# Altium footprint library laboE_altium.PcbLib: 676 footprints (part 22 of 43)
Each footprint in its own frame and in the unit in brackets; x right, y up, seen from the top. Pads: shape width x height; smd on the part's side, far side on the other; paste and mask are expansions set on the pad; w line width, h text height; cw(c..) or ccw(c..) is an arc to the next point about the centre after c.
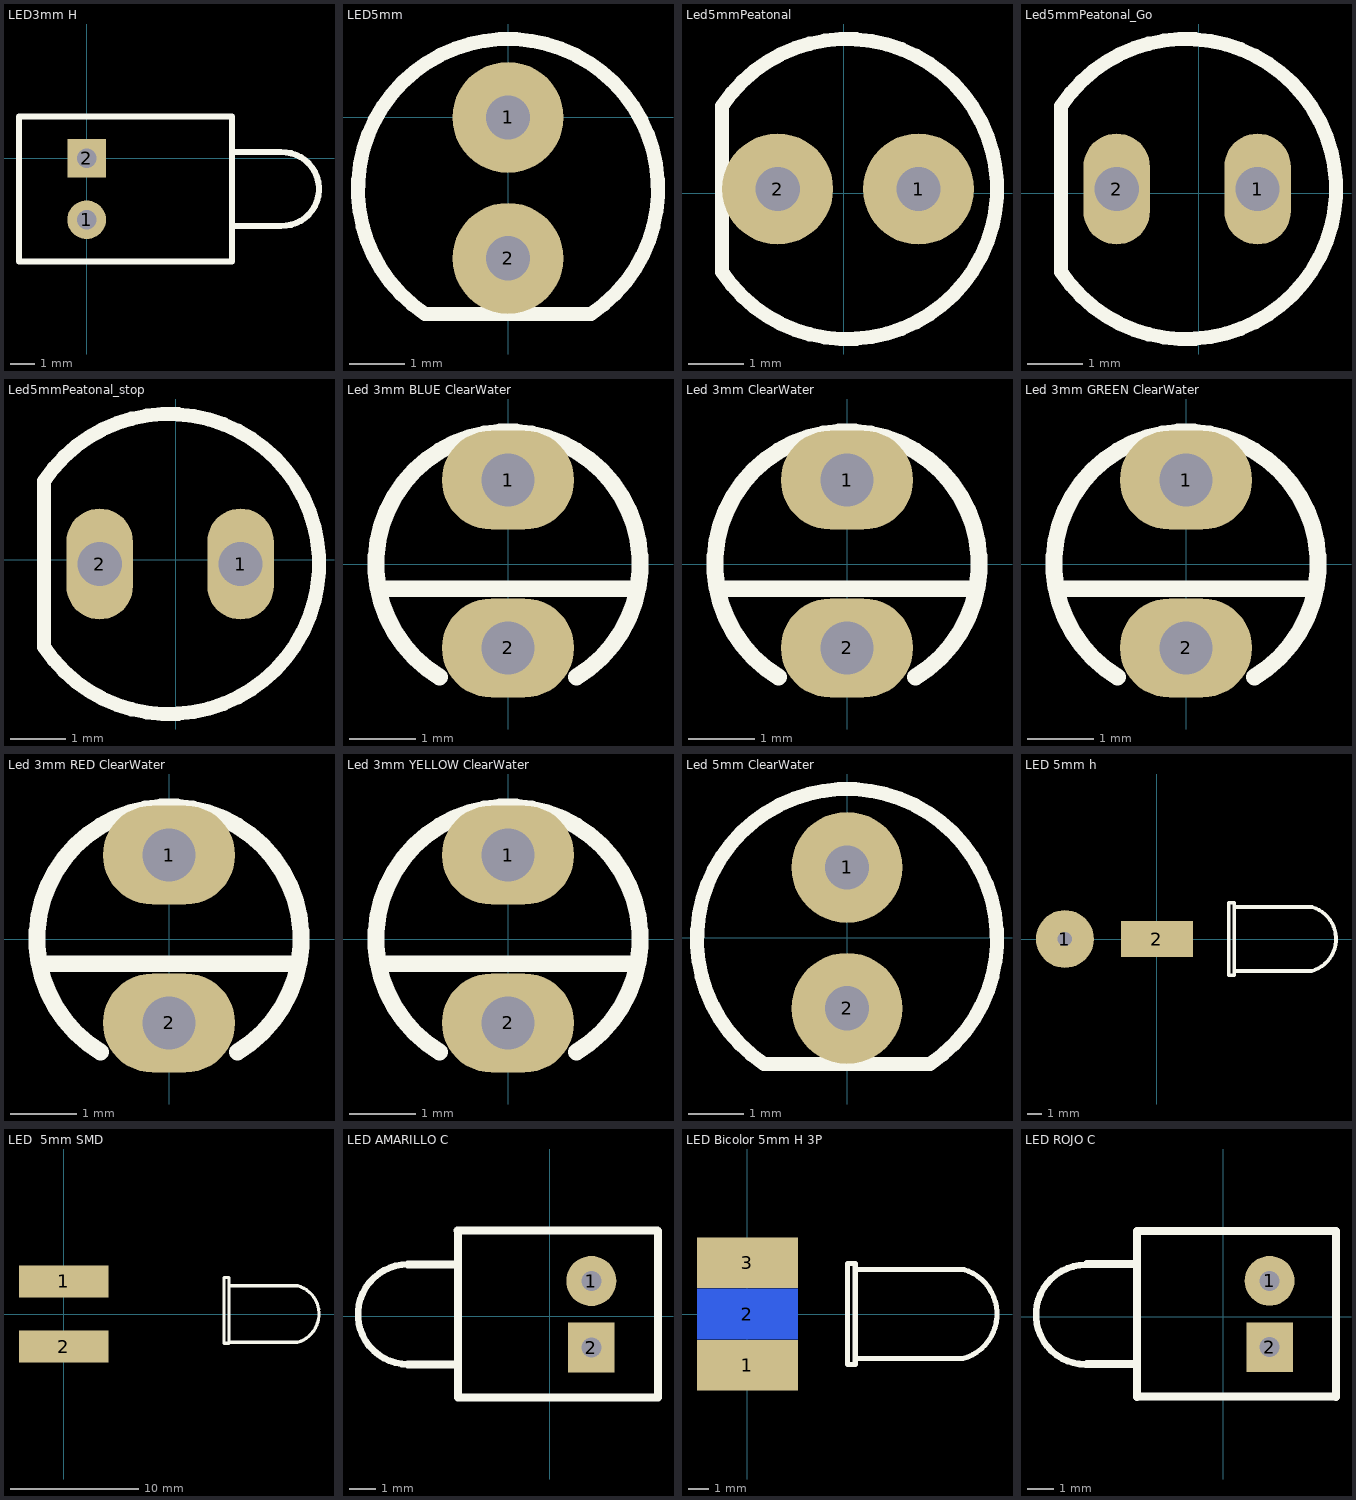
[diagram p21: the footprints below, top view; thin cyan lines are the x and y axes]

## LED3mm H [mm]
pads (2):
  round 1.6 hole 0.8: 1(0,-2.54)
  rect 1.6x1.6 hole 0.8: 2(0,0)
Top Overlay:
  lines w0.254: 0.006,-4.27 6.006,-4.27 ; 6.006,-4.27 6.006,1.73 -2.794,1.73 -2.794,-4.27 6.006,-4.27 ; 6.006,-2.794 6.006,0.254 8.038,0.254 cw(c8.078,-1.27) 8.038,-2.794 6.006,-2.794

## LED5mm [mm]
pads (2):
  round 2 hole 0.8: 1(0,0) 2(0,-2.54)
Top Overlay:
  lines w0.254: -1.5,-3.54 cw(c0,-1.29) 1.5,-3.54 -1.5,-3.54

## Led5mmPeatonal [mm]
pads (2):
  round 2 hole 0.8: 1(1.348,0.076) 2(-1.192,0.076)
Top Overlay:
  lines w0.254: -2.192,-1.424 ccw(c0.058,0.076) -2.192,1.576 -2.192,-1.424
3D body: height 0.5, standoff -0.5, extent -1.692,-0.424 -0.692,0.576
3D body: height 0.5, standoff -0.5, extent 0.848,-0.424 1.848,0.576
3D body: height -0.5, standoff -1.5, extent -1.422,-1.424 1.578,1.576
3D body: height -0.5, standoff -8.5, extent -2.421,-2.424 2.577,2.576

## Led5mmPeatonal_Go [mm]
pads (2):
  oval 1.2x2 hole 0.8: 1(1.063,0.074) 2(-1.477,0.074)
Top Overlay:
  lines w0.254: -2.477,-1.426 ccw(c-0.227,0.074) -2.477,1.574 -2.477,-1.426
3D body: height 0.5, standoff -0.5, extent 0.563,-0.426 1.563,0.574
3D body: height 0.5, standoff -0.5, extent -1.977,-0.426 -0.977,0.574
3D body: height -0.5, standoff -8.5, extent -2.706,-2.426 2.292,2.574

## Led5mmPeatonal_stop [mm]
pads (2):
  oval 1.2x2 hole 0.8: 1(1.164,-0.078) 2(-1.376,-0.078)
Top Overlay:
  lines w0.254: -2.376,-1.578 ccw(c-0.126,-0.078) -2.376,1.422 -2.376,-1.578
3D body: height 0.5, standoff -0.5, extent 0.665,-0.578 1.664,0.422
3D body: height 0.5, standoff -0.5, extent -1.875,-0.578 -0.876,0.422
3D body: height -0.5, standoff -8.5, extent -2.604,-2.578 2.393,2.422

## Led 3mm BLUE ClearWater [mm]
pads (2):
  oval 2x1.5 hole 0.8: 1(0,1.27) 2(0,-1.27)
Top Overlay:
  lines w0.254: -1.95,-0.375 1.95,-0.375 ; -1.035,-1.712 cw(c0,-0.001) 1.035,-1.712
3D body: height 5.5, standoff 2.5, extent -1.56,-1.358 1.438,1.642
3D body: height 1, standoff 0, extent -1.761,-1.466 1.779,1.793
3D body: height 4, standoff 0, extent -1.562,-1.358 1.438,1.642

## Led 3mm ClearWater [mm]
pads (2):
  oval 2x1.5 hole 0.8: 1(0,1.27) 2(0,-1.27)
Top Overlay:
  lines w0.254: -1.95,-0.375 1.95,-0.375 ; -1.035,-1.712 cw(c0,-0.001) 1.035,-1.712
3D body: height 4, standoff 0, extent -1.562,-1.358 1.438,1.642
3D body: height 1, standoff 0, extent -1.761,-1.466 1.779,1.793
3D body: height 5.5, standoff 2.5, extent -1.56,-1.358 1.438,1.642

## Led 3mm GREEN ClearWater [mm]
pads (2):
  oval 2x1.5 hole 0.8: 1(0,1.27) 2(0,-1.27)
Top Overlay:
  lines w0.254: -1.95,-0.375 1.95,-0.375 ; -1.035,-1.712 cw(c0,-0.001) 1.035,-1.712
3D body: height 5.5, standoff 2.5, extent -1.56,-1.358 1.438,1.642
3D body: height 1, standoff 0, extent -1.761,-1.466 1.779,1.793
3D body: height 4, standoff 0, extent -1.562,-1.358 1.438,1.642

## Led 3mm RED ClearWater [mm]
pads (2):
  oval 2x1.5 hole 0.8: 1(0,1.27) 2(0,-1.27)
Top Overlay:
  lines w0.254: -1.95,-0.375 1.95,-0.375 ; -1.035,-1.712 cw(c0,-0.001) 1.035,-1.712
3D body: height 4, standoff 0, extent -1.562,-1.358 1.438,1.642
3D body: height 1, standoff 0, extent -1.761,-1.466 1.779,1.793
3D body: height 5.5, standoff 2.5, extent -1.56,-1.358 1.438,1.642

## Led 3mm YELLOW ClearWater [mm]
pads (2):
  oval 2x1.5 hole 0.8: 1(0,1.27) 2(0,-1.27)
Top Overlay:
  lines w0.254: -1.95,-0.375 1.95,-0.375 ; -1.035,-1.712 cw(c0,-0.001) 1.035,-1.712
3D body: height 4, standoff 0, extent -1.562,-1.358 1.438,1.642
3D body: height 1, standoff 0, extent -1.761,-1.466 1.779,1.793
3D body: height 5.5, standoff 2.5, extent -1.56,-1.358 1.438,1.642

## Led 5mm ClearWater [mm]
pads (2):
  round 2 hole 0.8: 1(0,1.27) 2(0,-1.27)
Top Overlay:
  lines w0.254: -1.5,-2.27 cw(c0,-0.02) 1.5,-2.27 -1.5,-2.27
3D body: height 9.5, standoff 4.5, extent -2.559,-2.357 2.438,2.641
3D body: height 1, standoff 0, extent -2.835,-2.372 2.747,2.795
3D body: height 7, standoff 0, extent -2.562,-2.357 2.438,2.642

## LED 5mm h [mm]
pads (2):
  round 4 hole 1: 1(-6.35,0)
  rect 5x2.5 smd: 2(0,0)
Top Overlay:
  lines w0.254: 5.381,-2.212 10.668,-2.212 ccw(c10.059,0.003) 10.711,2.206 ; 5.381,2.212 10.668,2.212 ; 4.953,-2.5 5.334,-2.5 5.334,2.5 4.953,2.5 4.953,-2.5

## LED  5mm SMD [mm]
pads (2):
  rect 7x2.5 smd: 1(0,2.54) 2(0,-2.54)
Top Overlay:
  lines w0.254: 12.881,0 12.881,2.848 12.5,2.848 12.5,-2.286 12.881,-2.286 12.881,2.5 ; 12.928,-2.212 18.215,-2.212 ccw(c17.606,0.003) 18.258,2.206 ; 12.928,2.212 18.215,2.212

## LED AMARILLO C [mil]
pads (2):
  round 75 hole 30: 1(62.72,53.16)
  rect 70x75 hole 30: 2(62.72,-46.84)
Top Overlay:
  lines w10: -212.28,-71.84 cw(c-212.28,3.16) -212.28,78.16
  lines w12: -212.28,-71.84 -137.28,-71.84 ; -212.28,78.16 -137.28,78.16 ; -138.28,129.16 161.72,129.16 ; -137.28,128.16 -137.28,-121.84 ; 162.72,128.16 162.72,-121.84 ; -137.28,-121.84 162.72,-121.84 ; -137.28,-121.84 162.72,-121.84 ; -137.28,-121.84 162.72,-121.84 ; -137.28,-121.84 162.72,-121.84
3D body: height 236.22, standoff 7.87, extent -137.26,-121.82 162.7,128.14
3D body: height 196.85, standoff 39.37, extent -287.26,-71.82 -137.3,78.14
3D body: height 39.37, standoff -39.37, extent 43.19,33.52 82.41,72.81
3D body: height 39.37, standoff -39.37, extent 43.19,-66.48 82.41,-27.19

## LED Bicolor 5mm H 3P [mm]
pads (3):
  rect 5x2.5 smd: 1(0,-2.54) 3(0,2.54)
  rect 5x2.5 smd far side: 2(0,0)
Top Overlay:
  lines w0.254: 5.381,-2.212 10.668,-2.212 ccw(c10.059,0.003) 10.711,2.206 ; 5.381,2.212 10.668,2.212 ; 4.953,-2.5 5.334,-2.5 5.334,2.5 4.953,2.5 4.953,-2.5

## LED ROJO C [mil]
pads (2):
  round 75 hole 30: 1(70,54)
  rect 70x75 hole 30: 2(70,-46)
Top Overlay:
  lines w10: -207,-72 cw(c-207,3) -207,78
  lines w12: -205,-71 -130,-71 ; -205,79 -130,79 ; -130,-121 -130,129 ; -130,-120 170,-120 ; 170,-121 170,129 ; -130,129 170,129 ; -130,129 170,129
3D body: height 196.85, standoff 39.37, extent -281.98,-71.98 -132.02,77.98
3D body: height 236.22, standoff 7.87, extent -129.98,-120.98 169.98,128.98
3D body: height 39.37, standoff -39.37, extent 50.48,34.36 89.69,73.65
3D body: height 39.37, standoff -39.37, extent 50.48,-65.64 89.69,-26.35